# Altium footprint library DioneyaMain.PcbLib: 29 footprints (part 2 of 2)
Each footprint in its own frame and in the unit in brackets; x right, y up, seen from the top. Pads: shape width x height; smd on the part's side, far side on the other; paste and mask are expansions set on the pad; w line width, h text height; cw(c..) or ccw(c..) is an arc to the next point about the centre after c.
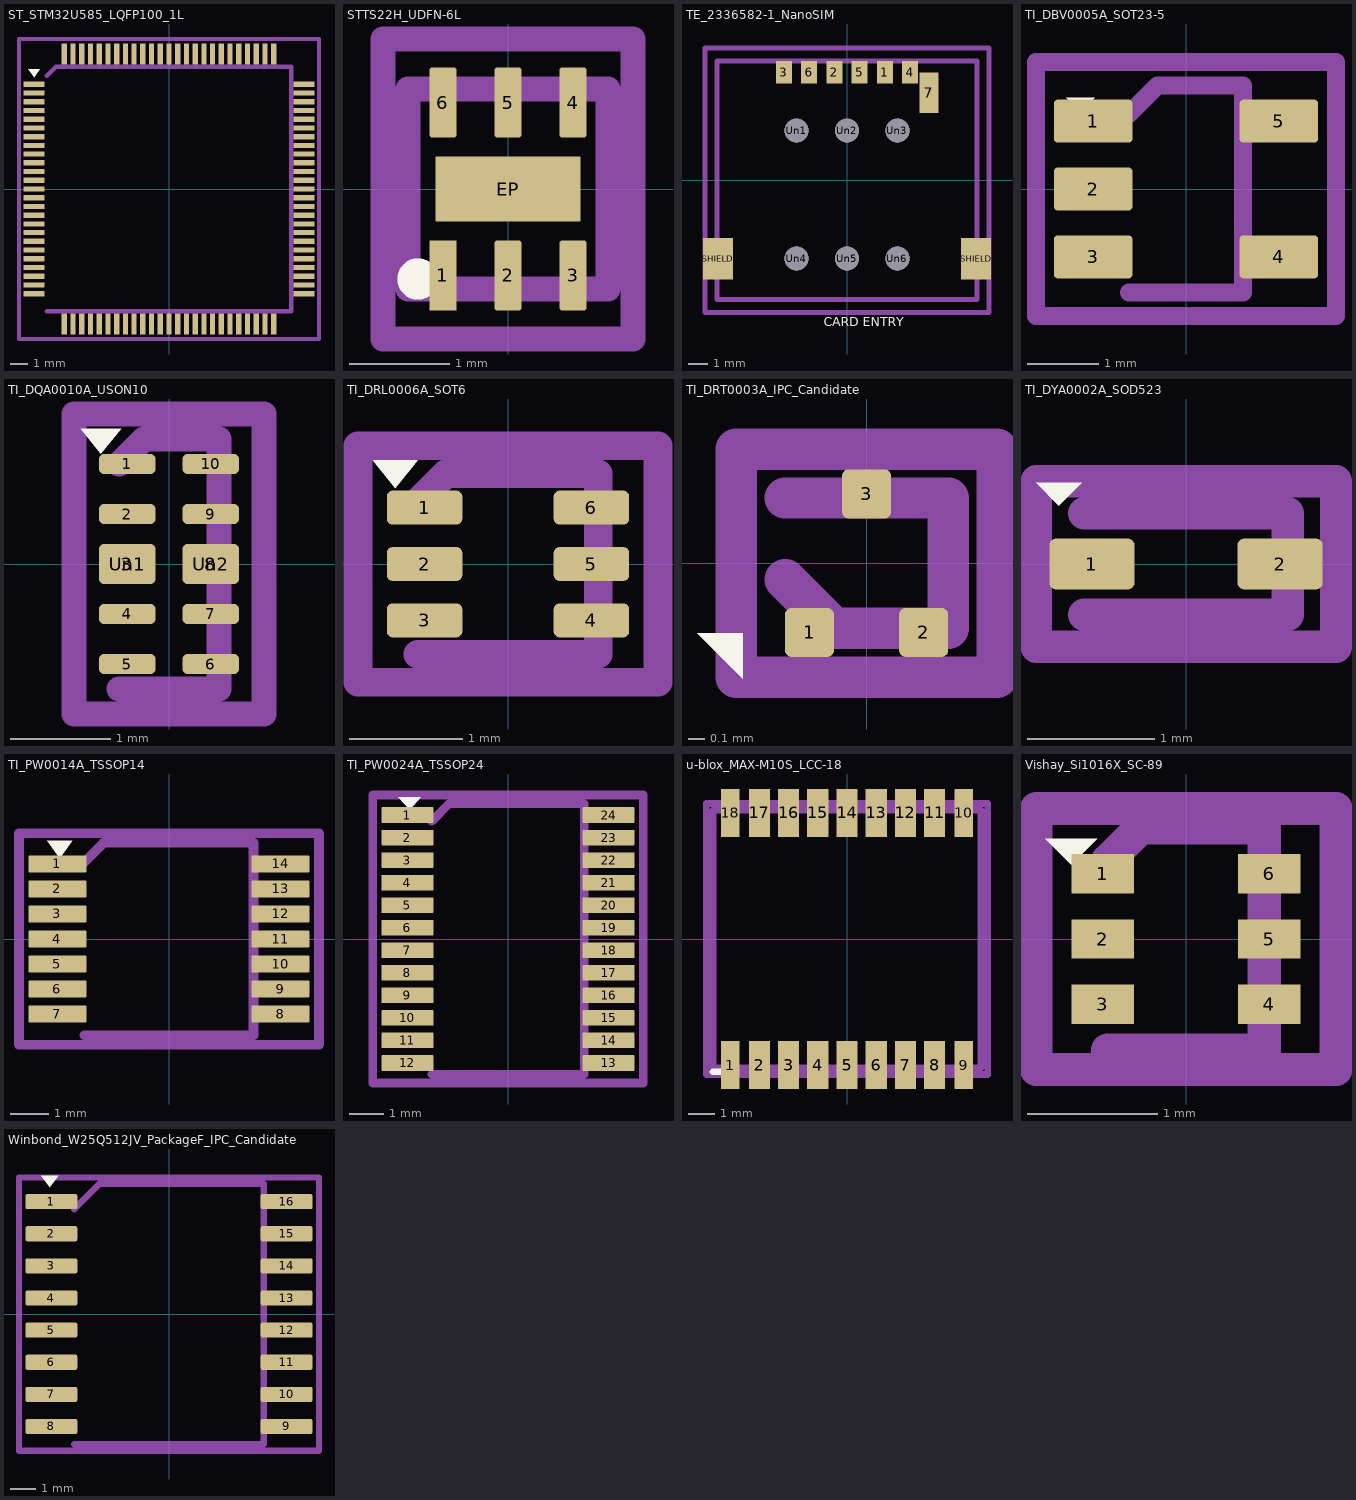
[diagram p1: the footprints below, top view; thin cyan lines are the x and y axes]

## ST_STM32U585_LQFP100_1L [mm]
pads (100):
  rect 1.2x0.3 smd: 1(-7.75,6) 2(-7.75,5.5) 3(-7.75,5) 4(-7.75,4.5) 5(-7.75,4) 6(-7.75,3.5) 7(-7.75,3) 8(-7.75,2.5) 9(-7.75,2) 10(-7.75,1.5) 11(-7.75,1) 12(-7.75,0.5) 13(-7.75,0) 14(-7.75,-0.5) 15(-7.75,-1) 16(-7.75,-1.5) 17(-7.75,-2) 18(-7.75,-2.5) 19(-7.75,-3) 20(-7.75,-3.5) 21(-7.75,-4) 22(-7.75,-4.5) 23(-7.75,-5) 24(-7.75,-5.5) 25(-7.75,-6) 51(7.75,-6) 52(7.75,-5.5) 53(7.75,-5) 54(7.75,-4.5) 55(7.75,-4) 56(7.75,-3.5) 57(7.75,-3) 58(7.75,-2.5) 59(7.75,-2) 60(7.75,-1.5) 61(7.75,-1) 62(7.75,-0.5) 63(7.75,0) 64(7.75,0.5) 65(7.75,1) 66(7.75,1.5) 67(7.75,2) 68(7.75,2.5) 69(7.75,3) 70(7.75,3.5) 71(7.75,4) 72(7.75,4.5) 73(7.75,5) 74(7.75,5.5) 75(7.75,6)
  rect 0.3x1.2 smd: 26(-6,-7.75) 27(-5.5,-7.75) 28(-5,-7.75) 29(-4.5,-7.75) 30(-4,-7.75) 31(-3.5,-7.75) 32(-3,-7.75) 33(-2.5,-7.75) 34(-2,-7.75) 35(-1.5,-7.75) 36(-1,-7.75) 37(-0.5,-7.75) 38(0,-7.75) 39(0.5,-7.75) 40(1,-7.75) 41(1.5,-7.75) 42(2,-7.75) 43(2.5,-7.75) 44(3,-7.75) 45(3.5,-7.75) 46(4,-7.75) 47(4.5,-7.75) 48(5,-7.75) 49(5.5,-7.75) 50(6,-7.75) 76(6,7.75) 77(5.5,7.75) 78(5,7.75) 79(4.5,7.75) 80(4,7.75) 81(3.5,7.75) 82(3,7.75) 83(2.5,7.75) 84(2,7.75) 85(1.5,7.75) 86(1,7.75) 87(0.5,7.75) 88(0,7.75) 89(-0.5,7.75) 90(-1,7.75) 91(-1.5,7.75) 92(-2,7.75) 93(-2.5,7.75) 94(-3,7.75) 95(-3.5,7.75) 96(-4,7.75) 97(-4.5,7.75) 98(-5,7.75) 99(-5.5,7.75) 100(-6,7.75)
F.SilkS:
  region: -7.738,6.41 -8.077,6.88 -7.398,6.88
F.Fab:
  lines w0.254: -7,-7 7,-7 7,7 -6.5,7 -7,6.5
F.CrtYd:
  lines w0.254: -8.6,-8.6 -8.6,8.6 8.6,8.6 8.6,-8.6 -8.6,-8.6

## STTS22H_UDFN-6L [mm]
pads (7):
  rect 0.27x0.7 smd: 1(-0.65,-0.865)
  rrect20% 0.27x0.7 smd: 2(0,-0.865) 3(0.65,-0.865) 4(0.65,0.865) 5(0,0.865) 6(-0.65,0.865)
  rect 1.45x0.65 smd: EP(0,0)
F.SilkS:
  circle w0.254: c-0.9,-0.9 r0.08
F.Fab:
  lines w0.254: -1,-1 -1,1 1,1 1,-1 -1,-1
F.CrtYd:
  lines w0.254: -1.25,-1.5 -1.25,1.5 1.25,1.5 1.25,-1.5 -1.25,-1.5

## TE_2336582-1_NanoSIM [mm]
pads (15):
  rect 0.8x1.14 smd: 1(1.905,5.43) 2(-0.635,5.43) 3(-3.175,5.43) 4(3.175,5.43) 5(0.635,5.43) 6(-1.905,5.43)
  rect 0.95x2.05 smd: 7(4.125,4.405)
  rect 1.5x2.1 smd: SHIELD(-6.5,-3.95) SHIELD(6.5,-3.95)
  round 1.2 hole 1.2: Un1(-2.54,2.5) Un2(0,2.5) Un3(2.54,2.5) Un4(-2.54,-3.94) Un5(0,-3.94) Un6(2.54,-3.94)
F.SilkS:
  text "CARD ENTRY" at -1.172,-7.527 h0.8
F.Fab:
  lines w0.254: -4.2,-6 4.2,-6 ; -6.545,-6 -6.545,6 6.545,6 6.545,-6 -6.545,-6
F.CrtYd:
  lines w0.254: -7.15,-6.65 -7.15,6.65 7.15,6.65 7.15,-6.65 -7.15,-6.65

## TI_DBV0005A_SOT23-5 [mm]
pads (5):
  rrect17% 1.1x0.6 smd: 1(-1.3,0.95) 2(-1.3,0) 3(-1.3,-0.95) 4(1.3,-0.95) 5(1.3,0.95)
F.SilkS:
  region: -1.48,1.08 -1.68,1.28 -1.28,1.28
F.Fab:
  lines w0.254: -0.8,-1.45 0.8,-1.45 0.8,1.45 -0.4,1.45 -0.8,1.05
F.CrtYd:
  lines w0.254: -2.1,-1.78 -2.1,1.78 2.1,1.78 2.1,-1.78 -2.1,-1.78

## TI_DQA0010A_USON10 [mm]
pads (12):
  rrect50% 0.565x0.2 smd: 1(-0.417,1) 2(-0.417,0.5) 4(-0.417,-0.5) 5(-0.417,-1) 6(0.417,-1) 7(0.417,-0.5) 9(0.417,0.5) 10(0.417,1)
  rrect25% 0.565x0.4 smd: 3(-0.417,0) 8(0.417,0)
  rrect28% 0.565x0.36 on Top Paste: Un1(-0.417,0) Un2(0.417,0)
F.SilkS:
  region: -0.68,1.1 -0.88,1.35 -0.48,1.35
F.Fab:
  lines w0.254: -0.5,-1.25 0.5,-1.25 0.5,1.25 -0.25,1.25 -0.5,1
F.CrtYd:
  lines w0.254: -0.95,-1.5 -0.95,1.5 0.95,1.5 0.95,-1.5 -0.95,-1.5

## TI_DRL0006A_SOT6 [mm]
pads (6):
  rrect33% 0.67x0.3 smd: 1(-0.74,0.5) 2(-0.74,0) 3(-0.74,-0.5) 4(0.74,-0.5) 5(0.74,0) 6(0.74,0.5)
F.SilkS:
  region: -1,0.67 -1.2,0.92 -0.8,0.92
F.Fab:
  lines w0.254: -0.8,-0.8 0.8,-0.8 0.8,0.8 -0.55,0.8 -0.8,0.55
F.CrtYd:
  lines w0.254: -1.33,-1.05 -1.33,1.05 1.33,1.05 1.33,-1.05 -1.33,-1.05

## TI_DRT0003A_IPC_Candidate [mm]
pads (3):
  rrect25% 0.3x0.3 smd: 1(-0.35,-0.425) 2(0.35,-0.425) 3(0,0.425)
F.SilkS:
  region: -0.76,-0.71 -1.04,-0.43 -0.76,-0.43
F.Fab:
  lines w0.254: -0.5,-0.1 -0.2,-0.4 0.5,-0.4 0.5,0.4 -0.5,0.4
F.CrtYd:
  lines w0.254: -0.8,-0.7 -0.8,0.7 0.8,0.7 0.8,-0.7 -0.8,-0.7

## TI_DYA0002A_SOD523 [mm]
pads (2):
  rrect25% 0.67x0.4 smd: 1(-0.74,0) 2(0.74,0)
F.SilkS:
  region: -1,0.46 -1.18,0.64 -0.82,0.64
F.Fab:
  lines w0.254: -0.8,-0.4 0.8,-0.4 0.8,0.4 -0.8,0.4
F.CrtYd:
  lines w0.254: -1.18,-0.65 -1.18,0.65 1.18,0.65 1.18,-0.65 -1.18,-0.65

## TI_PW0014A_TSSOP14 [mm]
pads (14):
  rrect11% 1.5x0.45 smd: 1(-2.9,1.95) 2(-2.9,1.3) 3(-2.9,0.65) 4(-2.9,0) 5(-2.9,-0.65) 6(-2.9,-1.3) 7(-2.9,-1.95) 8(2.9,-1.95) 9(2.9,-1.3) 10(2.9,-0.65) 11(2.9,0) 12(2.9,0.65) 13(2.9,1.3) 14(2.9,1.95)
F.SilkS:
  region: -2.84,2.1 -3.16,2.55 -2.52,2.55
F.Fab:
  lines w0.254: -2.2,-2.5 2.2,-2.5 2.2,2.5 -1.7,2.5 -2.2,2
F.CrtYd:
  lines w0.254: -3.9,-2.75 -3.9,2.75 3.9,2.75 3.9,-2.75 -3.9,-2.75

## TI_PW0024A_TSSOP24 [mm]
pads (24):
  rrect11% 1.5x0.45 smd: 1(-2.9,3.575) 2(-2.9,2.925) 3(-2.9,2.275) 4(-2.9,1.625) 5(-2.9,0.975) 6(-2.9,0.325) 7(-2.9,-0.325) 8(-2.9,-0.975) 9(-2.9,-1.625) 10(-2.9,-2.275) 11(-2.9,-2.925) 12(-2.9,-3.575) 13(2.9,-3.575) 14(2.9,-2.925) 15(2.9,-2.275) 16(2.9,-1.625) 17(2.9,-0.975) 18(2.9,-0.325) 19(2.9,0.325) 20(2.9,0.975) 21(2.9,1.625) 22(2.9,2.275) 23(2.9,2.925) 24(2.9,3.575)
F.SilkS:
  region: -2.84,3.73 -3.16,4.08 -2.52,4.08
F.Fab:
  lines w0.254: -2.2,-3.9 2.2,-3.9 2.2,3.9 -1.7,3.9 -2.2,3.4
F.CrtYd:
  lines w0.254: -3.9,-4.15 -3.9,4.15 3.9,4.15 3.9,-4.15 -3.9,-4.15

## u-blox_MAX-M10S_LCC-18 [mm]
pads (18):
  rect 0.7x1.8 smd: 1(-4.4,-4.75) 9(4.4,-4.75) 10(4.4,4.75) 18(-4.4,4.75)
  rect 0.8x1.8 smd: 2(-3.3,-4.75) 3(-2.2,-4.75) 4(-1.1,-4.75) 5(0,-4.75) 6(1.1,-4.75) 7(2.2,-4.75) 8(3.3,-4.75) 11(3.3,4.75) 12(2.2,4.75) 13(1.1,4.75) 14(0,4.75) 15(-1.1,4.75) 16(-2.2,4.75) 17(-3.3,4.75)
F.SilkS:
  lines w0.254: -5.05,-5 -4.55,-5
F.Fab:
  lines w0.254: -5.05,-4.85 -5.05,4.85 5.05,4.85 5.05,-4.85 -5.05,-4.85
F.CrtYd:
  lines w0.254: -5.3,-5.1 -5.3,5.1 5.3,5.1 5.3,-5.1 -5.3,-5.1

## Vishay_Si1016X_SC-89 [mm]
pads (6):
  rect 0.478x0.3 smd: 1(-0.638,0.5) 2(-0.638,0) 3(-0.638,-0.5) 4(0.638,-0.5) 5(0.638,0) 6(0.638,0.5)
F.SilkS:
  region: -0.88,0.57 -1.08,0.77 -0.68,0.77
F.Fab:
  lines w0.254: -0.6,-0.85 0.6,-0.85 0.6,0.85 -0.35,0.85 -0.6,0.6
F.CrtYd:
  lines w0.254: -1.15,-1 -1.15,1 1.15,1 1.15,-1 -1.15,-1

## Winbond_W25Q512JV_PackageF_IPC_Candidate [mm]
pads (16):
  rrect25% 2.05x0.6 smd: 1(-4.65,4.445) 2(-4.65,3.175) 3(-4.65,1.905) 4(-4.65,0.635) 5(-4.65,-0.635) 6(-4.65,-1.905) 7(-4.65,-3.175) 8(-4.65,-4.445) 9(4.65,-4.445) 10(4.65,-3.175) 11(4.65,-1.905) 12(4.65,-0.635) 13(4.65,0.635) 14(4.65,1.905) 15(4.65,3.175) 16(4.65,4.445)
F.SilkS:
  region: -4.713,5.005 -5.052,5.475 -4.373,5.475
F.Fab:
  lines w0.254: -3.75,-5.15 3.75,-5.15 3.75,5.15 -2.75,5.15 -3.75,4.15
F.CrtYd:
  lines w0.254: -5.93,-5.4 -5.93,5.4 5.93,5.4 5.93,-5.4 -5.93,-5.4